# Altium footprint library footprints.PcbLib: 65 footprints (part 3 of 5)
Each footprint in its own frame and in the unit in brackets; x right, y up, seen from the top. Pads: shape width x height; smd on the part's side, far side on the other; paste and mask are expansions set on the pad; w line width, h text height; cw(c..) or ccw(c..) is an arc to the next point about the centre after c.
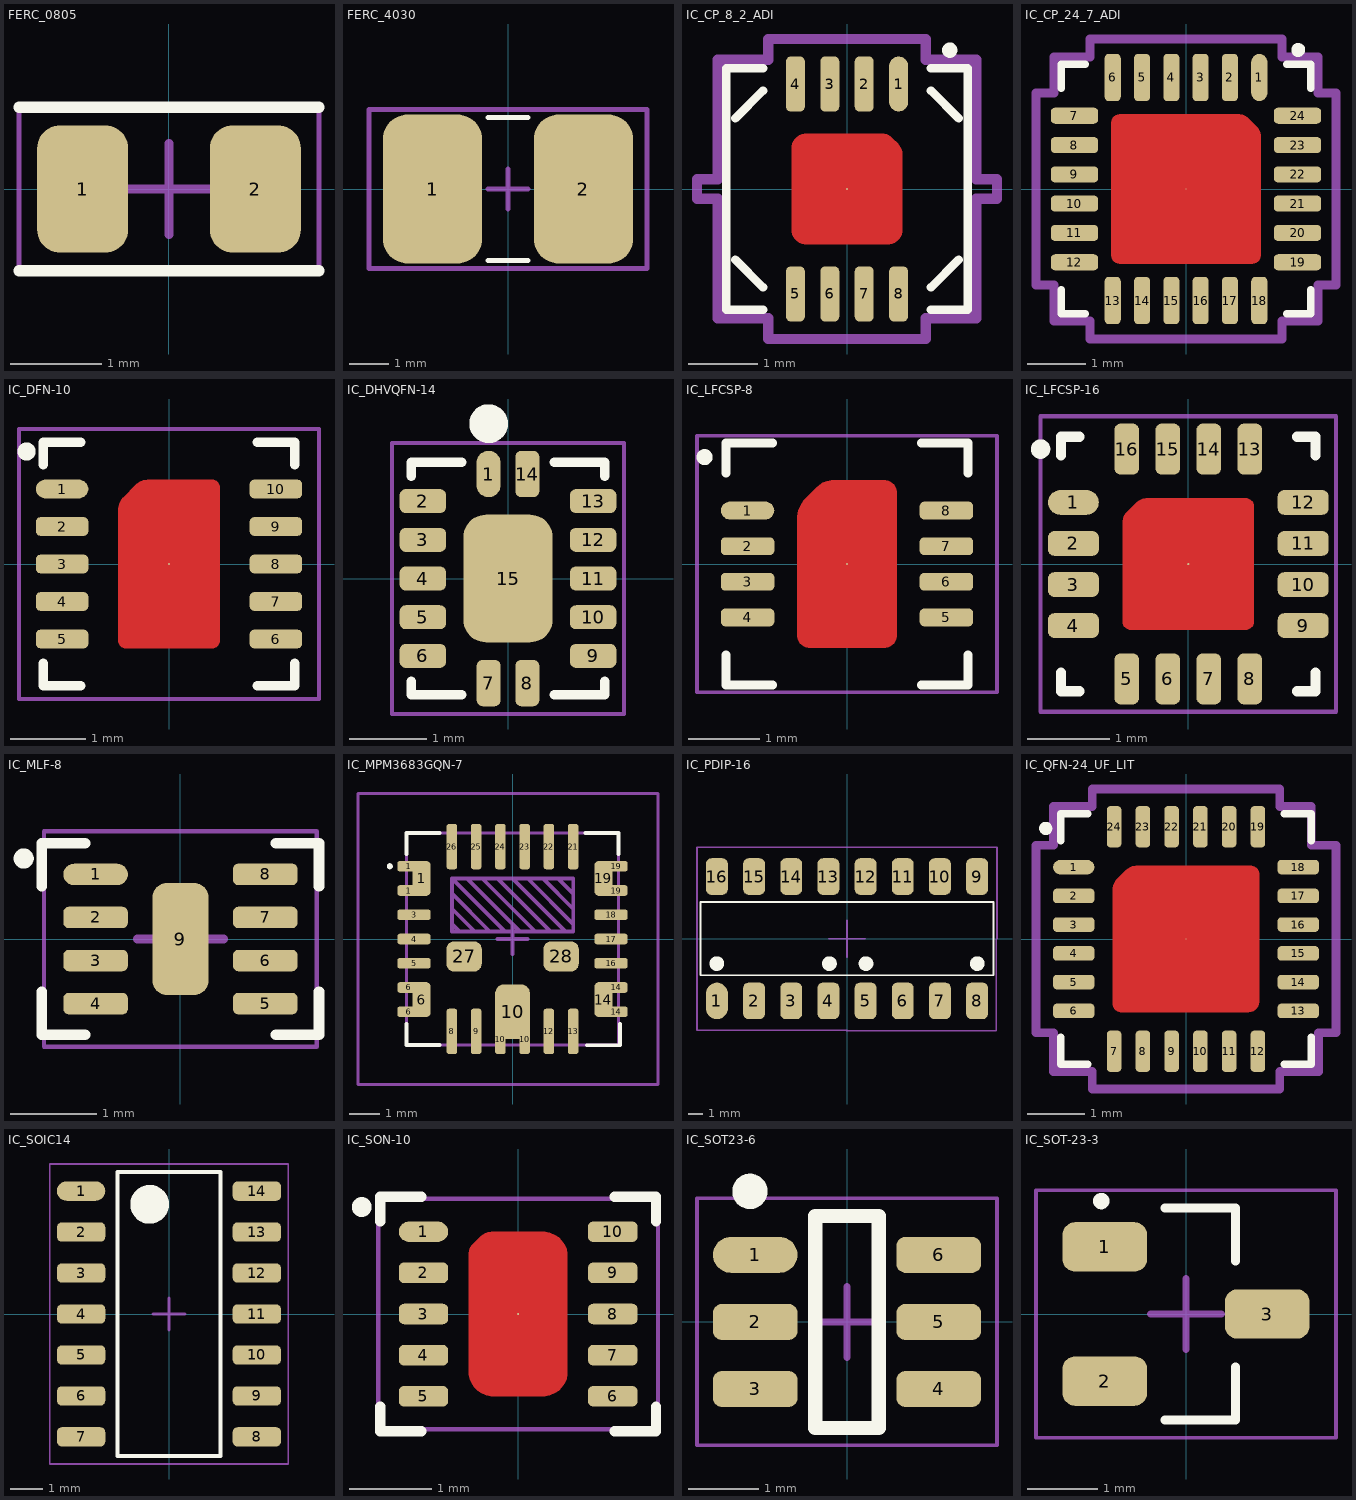
[diagram p2: the footprints below, top view; thin cyan lines are the x and y axes]

## FERC_0805 [mm] "Chip Resistor, 2-Leads, Body 2,00x1,25mm, IPC Medium Density"
height 0.55
pads (2):
  rrect50% 1x1.4 smd: 1(-0.95,0) 2(0.95,0)
Top Overlay:
  lines w0.125: -1.65,-0.9 1.65,-0.9 ; -1.65,0.9 1.65,0.9
Mechanical 15:
  lines w0.05: -1.65,-0.9 1.65,-0.9 1.65,0.9 -1.65,0.9 -1.65,-0.9
  lines w0.1: -0.5,0 0.5,0 ; 0,-0.5 0,0.5
3D body "RESC2012X06N.step": height 0.55, standoff 0, extent -1.05,-0.7 1.05,0.7

## FERC_4030 [mm]
pads (2):
  rrect50% 2.5x3.75 smd: 1(-1.9,0) 2(1.9,0)
Top Overlay:
  lines w0.125: -0.5,-1.8 0.5,-1.8 ; -0.5,1.8 0.5,1.8
Mechanical 15:
  lines w0.125: -0.5,0 0,0 ; 0,-0.5 0,0 ; 0,0.5 0,0 ; 0.5,0 0,0 ; -3.5,-2 -3.5,2 3.5,2 3.5,-2 -3.5,-2
3D body "Download_STP_WE-PBF-4030-7427934 (rev1).stp": height 2.32, standoff 0.05, extent -2.175,-1.6 2.325,1.4

## IC_CP_8_2_ADI [mm]
pads (9):
  oval 0.275x0.8 smd: 1(0.75,1.525)
  rrect50% 0.275x0.8 smd: 2(0.25,1.525) 3(-0.25,1.525) 4(-0.75,1.525) 5(-0.75,-1.525) 6(-0.25,-1.525) 7(0.25,-1.525) 8(0.75,-1.525)
  round 0.025 smd paste-2539.97: HTAB(0,0)
Top Layer:
  region: -0.8,0.6 -0.8,-0.6 -0.8,-0.62 -0.792,-0.658 -0.777,-0.695 -0.755,-0.727 -0.727,-0.755 -0.695,-0.777 -0.658,-0.792 -0.62,-0.8 -0.6,-0.8 0.6,-0.8 0.62,-0.8 0.658,-0.792 0.695,-0.777 0.727,-0.755 0.755,-0.727 0.777,-0.695 0.792,-0.658 0.8,-0.62 0.8,-0.6 0.8,0.514 0.8,0.534 0.792,0.572 0.777,0.609 0.755,0.642 0.741,0.656 0.65,0.747 0.638,0.759 0.608,0.779 0.575,0.793 0.54,0.8 0.522,0.8 -0.6,0.8 -0.62,0.8 -0.658,0.792 -0.695,0.777 -0.727,0.755 -0.755,0.727 -0.777,0.695 -0.792,0.658 -0.8,0.62
Top Overlay:
  circle w0.125: c1.492,2.017 r0.049
  lines w0.125: -1.625,-1.025 -1.22,-1.43 ; -1.625,1.025 -1.22,1.43 ; -1.22,-1.752 -1.752,-1.752 -1.752,1.752 -1.22,1.752 ; 1.22,-1.752 1.752,-1.752 1.752,1.752 1.22,1.752 ; 1.22,-1.43 1.625,-1.025 ; 1.22,1.43 1.625,1.025
Top Paste:
  region: -0.5,0.7 0.5,0.7 0.54,0.7 0.613,0.67 0.67,0.613 0.7,0.54 0.7,0.5 0.7,-0.5 0.7,-0.54 0.67,-0.613 0.613,-0.67 0.54,-0.7 0.5,-0.7 -0.5,-0.7 -0.54,-0.7 -0.613,-0.67 -0.67,-0.613 -0.7,-0.54 -0.7,-0.5 -0.7,0.5 -0.7,0.54 -0.67,0.613 -0.613,0.67 -0.54,0.7
Mechanical 15:
  lines w0.152: -2.179,-0.142 -1.879,-0.142 -1.879,-1.879 -1.141,-1.879 -1.141,-2.179 1.141,-2.179 1.141,-1.879 1.879,-1.879 1.879,-0.142 2.179,-0.142 2.179,0.142 1.879,0.142 1.879,1.879 1.141,1.879 1.141,2.179 -1.141,2.179 -1.141,1.879 -1.879,1.879 -1.879,0.142 -2.179,0.142 -2.179,-0.142
3D body "CP_8_2_ADI.step": height 0.9, standoff 0, extent -1.6,-1.625 1.6,1.625

## IC_CP_24_7_ADI [mm]
pads (25):
  oval 0.275x0.805 smd: 1(1.25,1.902)
  rrect50% 0.275x0.805 smd: 2(0.75,1.902) 3(0.25,1.902) 4(-0.25,1.902) 5(-0.75,1.902) 6(-1.25,1.902) 13(-1.25,-1.902) 14(-0.75,-1.902) 15(-0.25,-1.902) 16(0.25,-1.902) 17(0.75,-1.902) 18(1.25,-1.902)
  rrect50% 0.805x0.275 smd: 7(-1.902,1.25) 8(-1.902,0.75) 9(-1.902,0.25) 10(-1.902,-0.25) 11(-1.902,-0.75) 12(-1.902,-1.25) 19(1.902,-1.25) 20(1.902,-0.75) 21(1.902,-0.25) 22(1.902,0.25) 23(1.902,0.75) 24(1.902,1.25)
  round 0.025 smd paste-2539.97: HTAB(0,0)
Top Layer:
  region: -1.275,1.125 -1.275,-1.125 -1.275,-1.14 -1.269,-1.169 -1.258,-1.196 -1.242,-1.221 -1.221,-1.242 -1.196,-1.258 -1.169,-1.269 -1.14,-1.275 -1.125,-1.275 1.125,-1.275 1.14,-1.275 1.169,-1.269 1.196,-1.258 1.221,-1.242 1.242,-1.221 1.258,-1.196 1.269,-1.169 1.275,-1.14 1.275,-1.125 1.275,0.898 1.275,0.921 1.266,0.965 1.249,1.006 1.224,1.043 1.209,1.059 1.058,1.209 1.043,1.225 1.006,1.249 0.965,1.266 0.921,1.275 0.899,1.275 -1.125,1.275 -1.14,1.275 -1.169,1.269 -1.196,1.258 -1.221,1.242 -1.242,1.221 -1.258,1.196 -1.269,1.169 -1.275,1.14
Top Overlay:
  circle w0.125: c1.915,2.372 r0.056
  lines w0.125: -2.127,-1.72 -2.127,-2.127 -1.72,-2.127 ; -2.127,1.72 -2.127,2.127 -1.72,2.127 ; 1.72,-2.127 2.127,-2.127 2.127,-1.72 ; 1.72,2.127 2.127,2.127 2.127,1.72
Top Paste:
  region: 1.1,-0.1 0.2,-0.1 0.18,-0.1 0.143,-0.115 0.115,-0.143 0.1,-0.18 0.1,-0.2 0.1,-1.1 0.1,-1.125 0.119,-1.171 0.154,-1.206 0.2,-1.225 0.225,-1.225 1.075,-1.225 1.105,-1.225 1.16,-1.202 1.202,-1.16 1.225,-1.105 1.225,-1.075 1.225,-0.225 1.225,-0.2 1.206,-0.154 1.171,-0.119 1.125,-0.1
  region: 0.1,1.1 0.1,0.2 0.1,0.18 0.115,0.143 0.143,0.115 0.18,0.1 0.2,0.1 1.1,0.1 1.125,0.1 1.171,0.119 1.206,0.154 1.225,0.2 1.225,0.225 1.225,1.075 1.225,1.105 1.202,1.16 1.16,1.202 1.105,1.225 1.075,1.225 0.225,1.225 0.2,1.225 0.154,1.206 0.119,1.171 0.1,1.125
  region: -1.1,0.1 -0.2,0.1 -0.18,0.1 -0.143,0.115 -0.115,0.143 -0.1,0.18 -0.1,0.2 -0.1,1.1 -0.1,1.125 -0.119,1.171 -0.154,1.206 -0.2,1.225 -0.225,1.225 -1.075,1.225 -1.105,1.225 -1.16,1.202 -1.202,1.16 -1.225,1.105 -1.225,1.075 -1.225,0.225 -1.225,0.2 -1.206,0.154 -1.171,0.119 -1.125,0.1
  region: -0.094,-1.111 -0.094,-0.211 -0.094,-0.191 -0.109,-0.154 -0.137,-0.126 -0.174,-0.111 -0.194,-0.111 -1.094,-0.111 -1.119,-0.111 -1.165,-0.13 -1.2,-0.165 -1.219,-0.211 -1.219,-0.236 -1.219,-1.086 -1.219,-1.116 -1.196,-1.171 -1.154,-1.213 -1.099,-1.236 -1.069,-1.236 -0.219,-1.236 -0.194,-1.236 -0.148,-1.217 -0.113,-1.182 -0.094,-1.136
Mechanical 15:
  lines w0.152: -2.559,-1.641 -2.254,-1.641 -2.254,-2.254 -1.641,-2.254 -1.641,-2.559 1.641,-2.559 1.641,-2.254 2.254,-2.254 2.254,-1.641 2.559,-1.641 2.559,1.641 2.254,1.641 2.254,2.254 1.641,2.254 1.641,2.559 -1.641,2.559 -1.641,2.254 -2.254,2.254 -2.254,1.641 -2.559,1.641 -2.559,-1.641
3D body "CP_24_7_ADI.step": height 1, standoff 0, extent -2,-2 2,2

## IC_DFN-10 [mm]
pads (11):
  oval 0.7x0.25 smd: 1(-1.425,1)
  rrect50% 0.7x0.25 smd: 2(-1.425,0.5) 3(-1.425,0) 4(-1.425,-0.5) 5(-1.425,-1) 6(1.425,-1) 7(1.425,-0.5) 8(1.425,0) 9(1.425,0.5) 10(1.425,1)
  round 0.025 smd paste-2539.97: 11(0,0)
Top Layer:
  region: -0.675,0.719 -0.675,-1.025 -0.675,-1.045 -0.66,-1.082 -0.632,-1.11 -0.595,-1.125 -0.575,-1.125 0.575,-1.125 0.595,-1.125 0.632,-1.11 0.66,-1.082 0.675,-1.045 0.675,-1.025 0.675,1.025 0.675,1.045 0.66,1.082 0.632,1.11 0.595,1.125 0.575,1.125 -0.264,1.125 -0.29,1.125 -0.342,1.115 -0.391,1.094 -0.435,1.065 -0.454,1.046 -0.6,0.9 -0.618,0.882 -0.646,0.84 -0.665,0.794 -0.675,0.744
Top Overlay:
  circle w0.15: c-1.9,1.5 r0.046
  lines w0.125: -1.675,-1.325 -1.675,-1.625 -1.175,-1.625 ; -1.675,1.325 -1.675,1.625 -1.175,1.625 ; 1.175,-1.625 1.675,-1.625 1.675,-1.325 ; 1.175,1.625 1.675,1.625 1.675,1.325
Top Paste:
  region: -0.5,-0.4 0.5,-0.4 0.52,-0.4 0.557,-0.415 0.585,-0.443 0.6,-0.48 0.6,-0.5 0.6,-0.9 0.6,-0.92 0.585,-0.957 0.557,-0.985 0.52,-1 0.5,-1 -0.5,-1 -0.52,-1 -0.557,-0.985 -0.585,-0.957 -0.6,-0.92 -0.6,-0.9 -0.6,-0.5 -0.6,-0.48 -0.585,-0.443 -0.557,-0.415 -0.52,-0.4
  region: -0.5,1 0.5,1 0.52,1 0.557,0.985 0.585,0.957 0.6,0.92 0.6,0.9 0.6,0.5 0.6,0.48 0.585,0.443 0.557,0.415 0.52,0.4 0.5,0.4 -0.5,0.4 -0.52,0.4 -0.557,0.415 -0.585,0.443 -0.6,0.48 -0.6,0.5 -0.6,0.9 -0.6,0.92 -0.585,0.957 -0.557,0.985 -0.52,1
  region: -0.5,0.3 0.5,0.3 0.52,0.3 0.557,0.285 0.585,0.257 0.6,0.22 0.6,0.2 0.6,-0.2 0.6,-0.22 0.585,-0.257 0.557,-0.285 0.52,-0.3 0.5,-0.3 -0.5,-0.3 -0.52,-0.3 -0.557,-0.285 -0.585,-0.257 -0.6,-0.22 -0.6,-0.2 -0.6,0.2 -0.6,0.22 -0.585,0.257 -0.557,0.285 -0.52,0.3
Mechanical 15:
  lines w0.05: -2,-1.8 2,-1.8 2,1.8 -2,1.8 -2,-1.8
  lines w0.1: -0.5,0 0.5,0 ; 0,-0.5 0,0.5
3D body "LT3045EDD#TRPBF.stp": height 0.8, standoff 0, extent -1.55,-1.5 1.55,1.5

## IC_DHVQFN-14 [mm]
height 1
pads (15):
  oval 0.31x0.6 smd mask+0.05: 1(-0.25,1.35)
  rrect50% 0.6x0.31 smd mask+0.05: 2(-1.1,1) 3(-1.1,0.5) 4(-1.1,0) 5(-1.1,-0.5) 6(-1.1,-1) 9(1.1,-1) 10(1.1,-0.5) 11(1.1,0) 12(1.1,0.5) 13(1.1,1)
  rrect50% 0.31x0.6 smd mask+0.05: 7(-0.25,-1.35) 8(0.25,-1.35) 14(0.25,1.35)
  rrect50% 1.15x1.65 smd paste-2539.97 mask+0.075: 15(0,0)
Top Overlay:
  circle w0.25: c-0.25,2 r0.125
  lines w0.125: -1.25,-1.325 -1.25,-1.5 -0.6,-1.5 ; -1.25,1.325 -1.25,1.5 -0.6,1.5 ; 0.6,-1.5 1.25,-1.5 1.25,-1.325 ; 0.6,1.5 1.25,1.5 1.25,1.325
Top Paste:
  region: 0.4,0.7 -0.4,0.7 -0.42,0.7 -0.457,0.685 -0.485,0.657 -0.5,0.62 -0.5,0.6 -0.5,0.3 -0.5,0.28 -0.485,0.243 -0.457,0.215 -0.42,0.2 -0.4,0.2 0.4,0.2 0.42,0.2 0.457,0.215 0.485,0.243 0.5,0.28 0.5,0.3 0.5,0.6 0.5,0.62 0.485,0.657 0.457,0.685 0.42,0.7
  region: -0.4,-0.7 0.4,-0.7 0.42,-0.7 0.457,-0.685 0.485,-0.657 0.5,-0.62 0.5,-0.6 0.5,-0.3 0.5,-0.28 0.485,-0.243 0.457,-0.215 0.42,-0.2 0.4,-0.2 -0.4,-0.2 -0.42,-0.2 -0.457,-0.215 -0.485,-0.243 -0.5,-0.28 -0.5,-0.3 -0.5,-0.6 -0.5,-0.62 -0.485,-0.657 -0.457,-0.685 -0.42,-0.7
Mechanical 15:
  lines w0.05: -1.5,-1.75 1.5,-1.75 1.5,1.75 -1.5,1.75 -1.5,-1.75
  lines w0.1: -0.5,0 0.5,0 ; 0,-0.5 0,0.5
3D body "74LVC125ABQ,115.stp": height -1.51, standoff -2.36, extent -1.25,-1.501 1.252,1.501

## IC_LFCSP-8 [mm] "SON, 8-Leads, Body 3,00x3,00mm, Pitch 0,50mm, Thermal Pad 2,34x1,49mm, IPC Medium Density"
height 0.8
pads (9):
  oval 0.75x0.25 smd: 1(-1.395,0.75)
  rrect50% 0.75x0.25 smd: 2(-1.395,0.25) 3(-1.395,-0.25) 4(-1.395,-0.75) 5(1.395,-0.75) 6(1.395,-0.25) 7(1.395,0.25) 8(1.395,0.75)
  round 0.025 smd paste-2539.97: 9(0,0)
Top Layer:
  region: -0.525,-1.175 0.525,-1.175 0.542,-1.175 0.576,-1.168 0.608,-1.155 0.637,-1.136 0.661,-1.112 0.68,-1.083 0.693,-1.051 0.7,-1.017 0.7,-1 0.7,1 0.7,1.017 0.693,1.051 0.68,1.083 0.661,1.112 0.637,1.136 0.608,1.155 0.576,1.168 0.542,1.175 0.525,1.175 -0.189,1.175 -0.221,1.175 -0.285,1.162 -0.345,1.138 -0.398,1.102 -0.421,1.079 -0.576,0.924 -0.606,0.894 -0.652,0.825 -0.684,0.748 -0.7,0.667 -0.7,0.625 -0.7,-1 -0.7,-1.017 -0.693,-1.051 -0.68,-1.083 -0.661,-1.112 -0.637,-1.136 -0.608,-1.155 -0.576,-1.168 -0.542,-1.175
Top Overlay:
  circle w0.125: c-2,1.5 r0.05
  lines w0.125: -1.7,-1.275 -1.7,-1.7 -1.045,-1.7 ; -1.7,1.275 -1.7,1.7 -1.045,1.7 ; 1.045,-1.7 1.7,-1.7 1.7,-1.275 ; 1.045,1.7 1.7,1.7 1.7,1.275
Top Paste:
  region: -0.5,0.3 0.5,0.3 0.52,0.3 0.557,0.285 0.585,0.257 0.6,0.22 0.6,0.2 0.6,-0.2 0.6,-0.22 0.585,-0.257 0.557,-0.285 0.52,-0.3 0.5,-0.3 -0.5,-0.3 -0.52,-0.3 -0.557,-0.285 -0.585,-0.257 -0.6,-0.22 -0.6,-0.2 -0.6,0.2 -0.6,0.22 -0.585,0.257 -0.557,0.285 -0.52,0.3
  region: -0.5,-0.4 0.5,-0.4 0.52,-0.4 0.557,-0.415 0.585,-0.443 0.6,-0.48 0.6,-0.5 0.6,-0.9 0.6,-0.92 0.585,-0.957 0.557,-0.985 0.52,-1 0.5,-1 -0.5,-1 -0.52,-1 -0.557,-0.985 -0.585,-0.957 -0.6,-0.92 -0.6,-0.9 -0.6,-0.5 -0.6,-0.48 -0.585,-0.443 -0.557,-0.415 -0.52,-0.4
  region: -0.5,1 0.5,1 0.52,1 0.557,0.985 0.585,0.957 0.6,0.92 0.6,0.9 0.6,0.5 0.6,0.48 0.585,0.443 0.557,0.415 0.52,0.4 0.5,0.4 -0.5,0.4 -0.52,0.4 -0.557,0.415 -0.585,0.443 -0.6,0.48 -0.6,0.5 -0.6,0.9 -0.6,0.92 -0.585,0.957 -0.557,0.985 -0.52,1
Mechanical 15:
  lines w0.05: -2.105,-1.8 -2.105,1.8 2.105,1.8 2.105,-1.8 -2.105,-1.8
  lines w0.1: -0.5,0 0.5,0 ; 0,-0.5 0,0.5
3D body "SON50P300X80_HS-9N.step": height 0.8, standoff 0, extent -1.55,-1.5 1.55,1.6

## IC_LFCSP-16 [mm]
height 0.8
pads (17):
  oval 0.62x0.3 smd: 1(-1.4,0.75)
  rrect50% 0.62x0.3 smd: 2(-1.4,0.25) 3(-1.4,-0.25) 4(-1.4,-0.75) 9(1.4,-0.75) 10(1.4,-0.25) 11(1.4,0.25) 12(1.4,0.75)
  rrect50% 0.3x0.62 smd: 5(-0.75,-1.4) 6(-0.25,-1.4) 7(0.25,-1.4) 8(0.75,-1.4) 13(0.75,1.4) 14(0.25,1.4) 15(-0.25,1.4) 16(-0.75,1.4)
  round 0.025 smd paste-2539.97: 17(0,0)
Top Layer:
  region: -0.8,-0.7 -0.8,0.5 -0.8,0.519 -0.793,0.557 -0.778,0.592 -0.756,0.624 -0.743,0.638 -0.637,0.743 -0.624,0.757 -0.592,0.778 -0.557,0.793 -0.52,0.8 -0.501,0.8 0.7,0.8 0.72,0.8 0.757,0.785 0.785,0.757 0.8,0.72 0.8,0.7 0.8,-0.7 0.8,-0.72 0.785,-0.757 0.757,-0.785 0.72,-0.8 0.7,-0.8 -0.7,-0.8 -0.72,-0.8 -0.757,-0.785 -0.785,-0.757 -0.8,-0.72
Top Overlay:
  circle w0.125: c-1.8,1.4 r0.056
  lines w0.125: -1.55,-1.325 -1.55,-1.55 -1.325,-1.55 ; -1.55,1.325 -1.55,1.55 -1.325,1.55 ; 1.325,-1.55 1.55,-1.55 1.55,-1.325 ; 1.325,1.55 1.55,1.55 1.55,1.325
Top Paste:
  region: -0.5,0.7 0.5,0.7 0.54,0.7 0.613,0.67 0.67,0.613 0.7,0.54 0.7,0.5 0.7,-0.5 0.7,-0.54 0.67,-0.613 0.613,-0.67 0.54,-0.7 0.5,-0.7 -0.5,-0.7 -0.54,-0.7 -0.613,-0.67 -0.67,-0.613 -0.7,-0.54 -0.7,-0.5 -0.7,0.5 -0.7,0.54 -0.67,0.613 -0.613,0.67 -0.54,0.7
Mechanical 15:
  lines w0.05: -1.8,-1.8 -1.8,1.8 1.8,1.8 1.8,-1.8 -1.8,-1.8
  lines w0.1: -0.5,0 0.5,0 ; 0,-0.5 0,0.5
3D body "PQFN127P600-8N.step": height 0.8, standoff 0, extent -1.55,-1.55 1.55,1.55

## IC_MLF-8 [mm] "SON, 8-Leads, Body 2,00x2,00mm, Pitch 0,50mm, Thermal Pad 1,20x0,60mm, IPC Medium Density"
height 0.6
pads (9):
  oval 0.75x0.25 smd: 1(-0.985,0.75)
  rrect50% 0.75x0.25 smd: 2(-0.985,0.25) 3(-0.985,-0.25) 4(-0.985,-0.75) 5(0.985,-0.75) 6(0.985,-0.25) 7(0.985,0.25) 8(0.985,0.75)
  rrect50% 0.65x1.3 smd: 9(0,0)
Top Overlay:
  circle w0.125: c-1.82,0.935 r0.054
  lines w0.125: -1.609,-0.612 -1.609,-1.112 -1.109,-1.112 ; -1.609,0.612 -1.609,1.112 -1.109,1.112 ; 1.109,-1.112 1.609,-1.112 1.609,-0.612 ; 1.109,1.112 1.609,1.112 1.609,0.612
Mechanical 15:
  lines w0.05: -1.585,-1.25 1.585,-1.25 1.585,1.25 -1.585,1.25 -1.585,-1.25
  lines w0.1: -0.5,0 0.5,0 ; 0,-0.5 0,0.5
3D body "MIC5350-SGYMT-TR.stp": height 0.6, standoff 0, extent -1.05,-1 1.05,1

## IC_MPM3683GQN-7 [mm]
pads (33):
  rrect50% 0.75x0.35 smd: 1(-3.425,1.6) 1(-3.425,2.4) 6(-3.425,-2.4) 6(-3.425,-1.6) 14(3.425,-2.4) 14(3.425,-1.6) 19(3.425,1.6) 19(3.425,2.4)
  rrect50% 0.6x1.15 smd: 1(-3,2) 6(-3,-2) 14(3,-2) 19(3,2)
  rrect50% 1.1x0.35 smd: 3(-3.25,0.8) 4(-3.25,0) 5(-3.25,-0.8) 16(3.25,-0.8) 17(3.25,0) 18(3.25,0.8)
  rrect50% 0.35x1.5 smd: 8(-2,-3.05) 9(-1.2,-3.05) 12(1.2,-3.05) 13(2,-3.05) 21(2,3.05) 22(1.2,3.05) 23(0.4,3.05) 24(-0.4,3.05) 25(-1.2,3.05) 26(-2,3.05)
  rrect50% 0.35x1 smd: 10(-0.4,-3.3) 10(0.4,-3.3)
  rrect50% 1.15x1.8 smd paste-2539.97: 10(0,-2.4)
  rrect50% 1.17x1 smd paste-2539.97: 27(-1.6,-0.575) 28(1.6,-0.575)
Top Overlay:
  lines w0.1: -4.1,2.4 cw(c-4.05,2.4) -4,2.4 cw(c-4.05,2.4) -4.1,2.4
  lines w0.125: -3.5,-2.8 -3.5,-3.5 -2.4,-3.5 ; -3.5,2.8 -3.5,3.5 -2.4,3.5 ; 2.4,3.5 3.5,3.5 3.5,2.8 ; 2.448,-3.503 3.548,-3.503 3.548,-2.803
Top Paste:
  circle w0.65: c0,-2.1 r0.2
  circle w0.5: c-1.6,-0.575 r0.2
  circle w0.5: c1.6,-0.575 r0.2
Mechanical 15:
  lines w0.1: -3.5,-3.5 3.5,-3.5 3.5,3.5 -3.5,3.5 -3.5,-3.5
  lines w0.125: -2,0.5 -1.75,0.25 -1.25,0.25 -2,1 -2,1.125 ; -2,1.5 -0.75,0.25 ; -0.5,0 0,0 ; -0.25,0.25 -2,2 ; 0,-0.5 0,0 ; 0,0.5 0,0 ; 0.5,0 0,0 ; 0.5,0.25 0.25,0.25 -1.5,2 ; 0.75,0.25 -1,2 -0.5,2 1.25,0.25 ; 2,1.5 1.5,2 1,2 2,1 2,0.5 0.5,2 0,2 ; -2,2 -2,0.25 2,0.25 2,2 -2,2 ; -1.5,2 -1.5,2 ; 0,2 1.75,0.25 1.25,0.25 ; 0,2 0,2 ; 1.25,0.25 1.25,0.25
Mechanical 20:
  lines w0.1: -5.1,-4.8 4.8,-4.8 4.8,4.8 -5.1,4.8 -5.1,-4.8
3D body "MPM3683GQN-7.stp": height 3.98, standoff -0.03, extent -3.5,-3.525 3.5,3.475

## IC_PDIP-16 [mm]
pads (16):
  oval 1.5x2.5 smd: 1(-8.89,-4.25)
  rrect50% 1.5x2.5 smd: 2(-6.35,-4.25) 3(-3.81,-4.25) 4(-1.27,-4.25) 5(1.27,-4.25) 6(3.81,-4.25) 7(6.35,-4.25) 8(8.89,-4.25) 9(8.89,4.25) 10(6.35,4.25) 11(3.81,4.25) 12(1.27,4.25) 13(-1.27,4.25) 14(-3.81,4.25) 15(-6.35,4.25) 16(-8.89,4.25)
Top Overlay:
  circle w0.5: c8.9,-1.7 r0.25
  circle w0.5: c1.3,-1.7 r0.25
  circle w0.5: c-1.2,-1.7 r0.25
  circle w0.5: c-8.9,-1.7 r0.25
  lines w0.125: -10,-2.5 -10,2.5 10,2.5 10,-2.5 -10,-2.5
Mechanical 15:
  lines w0.125: -1.25,0 1.25,0 ; 0,-1.25 0,1.25 ; 10.204,-0.036 10.204,-6.286 ; 10.25,0 10.25,6.25 ; -10.25,-6.25 0,-6.25 -10.25,-6.25 ; -10.25,-6.25 -10.25,0 -10.25,6.25 ; -10.25,6.25 0,6.25 ; -10.25,6.25 0,6.25 ; 0,6.25 10.25,6.25 ; 0,6.25 10.25,6.25 ; 10.204,-6.286 -0.046,-6.286 10.204,-6.286
3D body "DIPSMD16.stp": height 3.85, standoff 0, extent -9.8,-4.8 10.04,4.8

## IC_QFN-24_UF_LIT [mm]
pads (25):
  oval 0.72x0.25 smd: 1(-1.952,1.25)
  rrect50% 0.72x0.25 smd: 2(-1.952,0.75) 3(-1.952,0.25) 4(-1.952,-0.25) 5(-1.952,-0.75) 6(-1.952,-1.25) 13(1.952,-1.25) 14(1.952,-0.75) 15(1.952,-0.25) 16(1.952,0.25) 17(1.952,0.75) 18(1.952,1.25)
  rrect50% 0.25x0.72 smd: 7(-1.25,-1.952) 8(-0.75,-1.952) 9(-0.25,-1.952) 10(0.25,-1.952) 11(0.75,-1.952) 12(1.25,-1.952) 19(1.25,1.952) 20(0.75,1.952) 21(0.25,1.952) 22(-0.25,1.952) 23(-0.75,1.952) 24(-1.25,1.952)
  round 0.025 smd paste-1.275: 25(0,0)
Top Layer:
  region: -1.275,0.849 -1.275,-1.125 -1.275,-1.14 -1.269,-1.169 -1.258,-1.196 -1.242,-1.221 -1.221,-1.242 -1.196,-1.258 -1.169,-1.269 -1.14,-1.275 -1.125,-1.275 1.075,-1.275 1.095,-1.275 1.133,-1.267 1.17,-1.252 1.202,-1.23 1.23,-1.202 1.252,-1.17 1.267,-1.133 1.275,-1.095 1.275,-1.075 1.275,1.125 1.275,1.14 1.269,1.169 1.258,1.196 1.242,1.221 1.221,1.242 1.196,1.258 1.169,1.269 1.14,1.275 1.125,1.275 -0.846,1.275 -0.875,1.275 -0.933,1.264 -0.987,1.241 -1.036,1.208 -1.057,1.187 -1.19,1.055 -1.21,1.034 -1.242,0.987 -1.264,0.934 -1.275,0.878
Top Overlay:
  circle w0.125: c-2.441,1.924 r0.052
  lines w0.125: -2.177,-1.707 -2.177,-2.177 -1.707,-2.177 ; -2.177,1.707 -2.177,2.177 -1.707,2.177 ; 1.707,-2.177 2.177,-2.177 2.177,-1.707 ; 1.707,2.177 2.177,2.177 2.177,1.707
Top Paste:
  region: 1,-0.1 0.3,-0.1 0.26,-0.1 0.187,-0.13 0.13,-0.187 0.1,-0.26 0.1,-0.3 0.1,-1 0.1,-1.035 0.127,-1.099 0.176,-1.148 0.24,-1.175 0.275,-1.175 1.025,-1.175 1.055,-1.175 1.11,-1.152 1.152,-1.11 1.175,-1.055 1.175,-1.025 1.175,-0.275 1.175,-0.24 1.148,-0.176 1.099,-0.127 1.035,-0.1
  region: 0.1,1 0.1,0.3 0.1,0.26 0.13,0.187 0.187,0.13 0.26,0.1 0.3,0.1 1,0.1 1.035,0.1 1.099,0.127 1.148,0.176 1.175,0.24 1.175,0.275 1.175,1.025 1.175,1.055 1.152,1.11 1.11,1.152 1.055,1.175 1.025,1.175 0.275,1.175 0.24,1.175 0.176,1.148 0.127,1.099 0.1,1.035
  region: -0.102,-0.998 -0.102,-0.298 -0.102,-0.258 -0.132,-0.185 -0.188,-0.129 -0.262,-0.098 -0.302,-0.098 -1.002,-0.098 -1.037,-0.098 -1.101,-0.125 -1.15,-0.174 -1.177,-0.238 -1.177,-0.273 -1.177,-1.023 -1.177,-1.053 -1.154,-1.108 -1.112,-1.15 -1.057,-1.173 -1.027,-1.173 -0.277,-1.173 -0.242,-1.173 -0.178,-1.147 -0.128,-1.097 -0.102,-1.033
  region: -1,0.1 -0.3,0.1 -0.26,0.1 -0.187,0.13 -0.13,0.187 -0.1,0.26 -0.1,0.3 -0.1,1 -0.1,1.035 -0.127,1.099 -0.176,1.148 -0.24,1.175 -0.275,1.175 -1.025,1.175 -1.055,1.175 -1.11,1.152 -1.152,1.11 -1.175,1.055 -1.175,1.025 -1.175,0.275 -1.175,0.24 -1.148,0.176 -1.099,0.127 -1.035,0.1
Mechanical 15:
  lines w0.152: -2.609,-1.629 -2.304,-1.629 -2.304,-2.304 -1.629,-2.304 -1.629,-2.609 1.629,-2.609 1.629,-2.304 2.304,-2.304 2.304,-1.629 2.609,-1.629 2.609,1.629 2.177,1.629 2.177,2.304 1.629,2.304 1.629,2.609 -1.629,2.609 -1.629,2.304 -2.304,2.304 -2.304,1.629 -2.609,1.629 -2.609,-1.629
3D body "THS4552IRTWR.stp": height 0.8, standoff 0, extent -2,-2 2,2

## IC_SOIC14 [mm] "SOIC, 14-Leads, Body 8,65x3,90mm, Pitch 1,27mm, IPC Medium Density"
height 1.75
pads (14):
  oval 1.5x0.6 smd: 1(-2.725,3.81)
  rrect50% 1.5x0.6 smd: 2(-2.725,2.54) 3(-2.725,1.27) 4(-2.725,0) 5(-2.725,-1.27) 6(-2.725,-2.54) 7(-2.725,-3.81) 8(2.725,-3.81) 9(2.725,-2.54) 10(2.725,-1.27) 11(2.725,0) 12(2.725,1.27) 13(2.725,2.54) 14(2.725,3.81)
Top Overlay:
  circle w0.6: c-0.6,3.4 r0.3
  lines w0.125: -1.6,-4.4 -1.6,4.4 1.6,4.4 1.6,-4.4 -1.6,-4.4
Mechanical 15:
  lines w0.05: -3.7,-4.65 -3.7,4.65 3.7,4.65 3.7,-4.65 -3.7,-4.65
  lines w0.1: -0.5,0 0.5,0 ; 0,-0.5 0,0.5
3D body "SOIC127P600X175-14N.step": height 1.75, standoff 0, extent -3,-4.4 3,4.4

## IC_SON-10 [mm]
pads (11):
  oval 0.6x0.25 smd: 1(-1.15,1)
  rrect50% 0.6x0.25 smd: 2(-1.15,0.5) 3(-1.15,0) 4(-1.15,-0.5) 5(-1.15,-1) 6(1.15,-1) 7(1.15,-0.5) 8(1.15,0) 9(1.15,0.5) 10(1.15,1)
  round 0.025 smd paste-2539.97: 11(0,0)
Top Layer:
  region: -0.6,-0.7 -0.6,0.722 -0.6,0.74 -0.593,0.777 -0.579,0.811 -0.558,0.842 -0.545,0.855 -0.47,0.93 -0.454,0.946 -0.414,0.973 -0.371,0.991 -0.324,1 -0.3,1 0.3,1 0.33,1 0.388,0.988 0.442,0.966 0.491,0.933 0.533,0.891 0.566,0.842 0.588,0.788 0.6,0.73 0.6,0.7 0.6,-0.7 0.6,-0.73 0.588,-0.788 0.566,-0.842 0.533,-0.891 0.491,-0.933 0.442,-0.966 0.388,-0.988 0.33,-1 0.3,-1 -0.3,-1 -0.33,-1 -0.388,-0.988 -0.442,-0.966 -0.491,-0.933 -0.533,-0.891 -0.566,-0.842 -0.588,-0.788 -0.6,-0.73
Top Overlay:
  circle w0.15: c-1.9,1.3 r0.046
  lines w0.125: -1.675,-1.125 -1.675,-1.425 -1.175,-1.425 ; -1.675,1.125 -1.675,1.425 -1.175,1.425 ; 1.175,-1.425 1.675,-1.425 1.675,-1.125 ; 1.175,1.425 1.675,1.425 1.675,1.125
Top Paste:
  region: -0.3,0.9 0.3,0.9 0.34,0.9 0.413,0.87 0.47,0.813 0.5,0.74 0.5,0.7 0.5,0.3 0.5,0.26 0.47,0.187 0.413,0.13 0.34,0.1 0.3,0.1 -0.3,0.1 -0.34,0.1 -0.413,0.13 -0.47,0.187 -0.5,0.26 -0.5,0.3 -0.5,0.7 -0.5,0.74 -0.47,0.813 -0.413,0.87 -0.34,0.9
  region: 0.3,-0.9 -0.3,-0.9 -0.34,-0.9 -0.413,-0.87 -0.47,-0.813 -0.5,-0.74 -0.5,-0.7 -0.5,-0.3 -0.5,-0.26 -0.47,-0.187 -0.413,-0.13 -0.34,-0.1 -0.3,-0.1 0.3,-0.1 0.34,-0.1 0.413,-0.13 0.47,-0.187 0.5,-0.26 0.5,-0.3 0.5,-0.7 0.5,-0.74 0.47,-0.813 0.413,-0.87 0.34,-0.9
Mechanical 15:
  lines w0.05: -1.7,-1.4 1.7,-1.4 1.7,1.4 -1.7,1.4 -1.7,-1.4
  lines w0.1: -0.5,0 0.5,0 ; 0,-0.5 0,0.5
3D body "TPS7A9001DSKT.stp": height 0.77, standoff 0, extent -1.25,-1.25 1.25,1.25

## IC_SOT23-6 [mm] "SOT23, 6-Leads, Body 2,90x2,90mm, Pitch 0,95mm, IPC Medium Density"
height 1.25
pads (6):
  oval 1.2x0.51 smd: 1(-1.3,0.95)
  rrect50% 1.2x0.51 smd: 2(-1.3,0) 3(-1.3,-0.95) 4(1.3,-0.95) 5(1.3,0) 6(1.3,0.95)
Top Overlay:
  circle w0.25: c-1.375,1.85 r0.125
  lines w0.2: -0.45,-1.5 0.45,-1.5 0.45,1.5 -0.45,1.5 -0.45,-1.5
Mechanical 15:
  lines w0.05: -2.125,-1.75 -2.125,1.75 2.125,1.75 2.125,-1.75 -2.125,-1.75
  lines w0.1: -0.5,0 0.5,0 ; 0,-0.5 0,0.5
3D body "IC_SOT32-6L_STM.step": height 1.25, standoff 0, extent -1.499,-1.511 1.499,1.511

## IC_SOT-23-3 [mm] "SOT23, 3-Leads, Body 2,90x2,90mm, Pitch 0,95mm, IPC Medium Density"
height 1.45
pads (3):
  rrect50% 1.2x0.7 smd: 1(-1.15,0.95) 2(-1.15,-0.95) 3(1.15,0)
Top Overlay:
  circle w0.125: c-1.2,1.6 r0.054
  lines w0.125: -0.3,-1.5 0.7,-1.5 0.7,-0.75 ; -0.3,1.5 0.7,1.5 0.7,0.75
Mechanical 15:
  lines w0.05: -2.125,-1.75 -2.125,1.75 2.125,1.75 2.125,-1.75 -2.125,-1.75
  lines w0.1: -0.5,0 0.5,0 ; 0,-0.5 0,0.5
3D body "SOT23.stp": height 1.02, standoff -0.01, extent -1.2,-1.45 1.215,1.45